# Altium schematic symbol library PBH4UEENAGVX.SchLib: 1 symbol
Pins are listed as number, name and electrical type; pins without a type are passive.

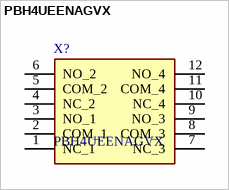
[diagram p0: symbol PBH4UEENAGVX]

## PBH4UEENAGVX
designator X?
PUSHBUTTON, 100mA, 30VDC 4PDT, On-On Through Hole, Right Angle; Manufacturer_Name: E-Switch; Geometry.Height: 9.35mm; Mouser Part Number: 612-PBH4UEENAGVX; Mouser Price/Stock: https://www.mouser.co.uk/ProductDetail/E-Switch/PBH4UEENAGVX?qs=QtyuwXswaQg0AcsFcToR1A%3D%3D; Manufacturer_Part_Number: PBH4UEENAGVX; Datasheet Link: https://configured-product-images.s3.amazonaws.com/2D/specs/PBH4UEENAGVX.pdf
footprint PBH4UEENAGVX
pins: 1 NC_1, 2 COM_1, 3 NO_1, 4 NC_2, 5 COM_2, 6 NO_2, 7 NC_3, 8 COM_3, 9 NO_3, 10 NC_4, 11 COM_4, 12 NO_4